# Altium schematic symbol library RF-LIB-SCH.SchLib: 8 symbols
Pins are listed as number, name and electrical type; pins without a type are passive.

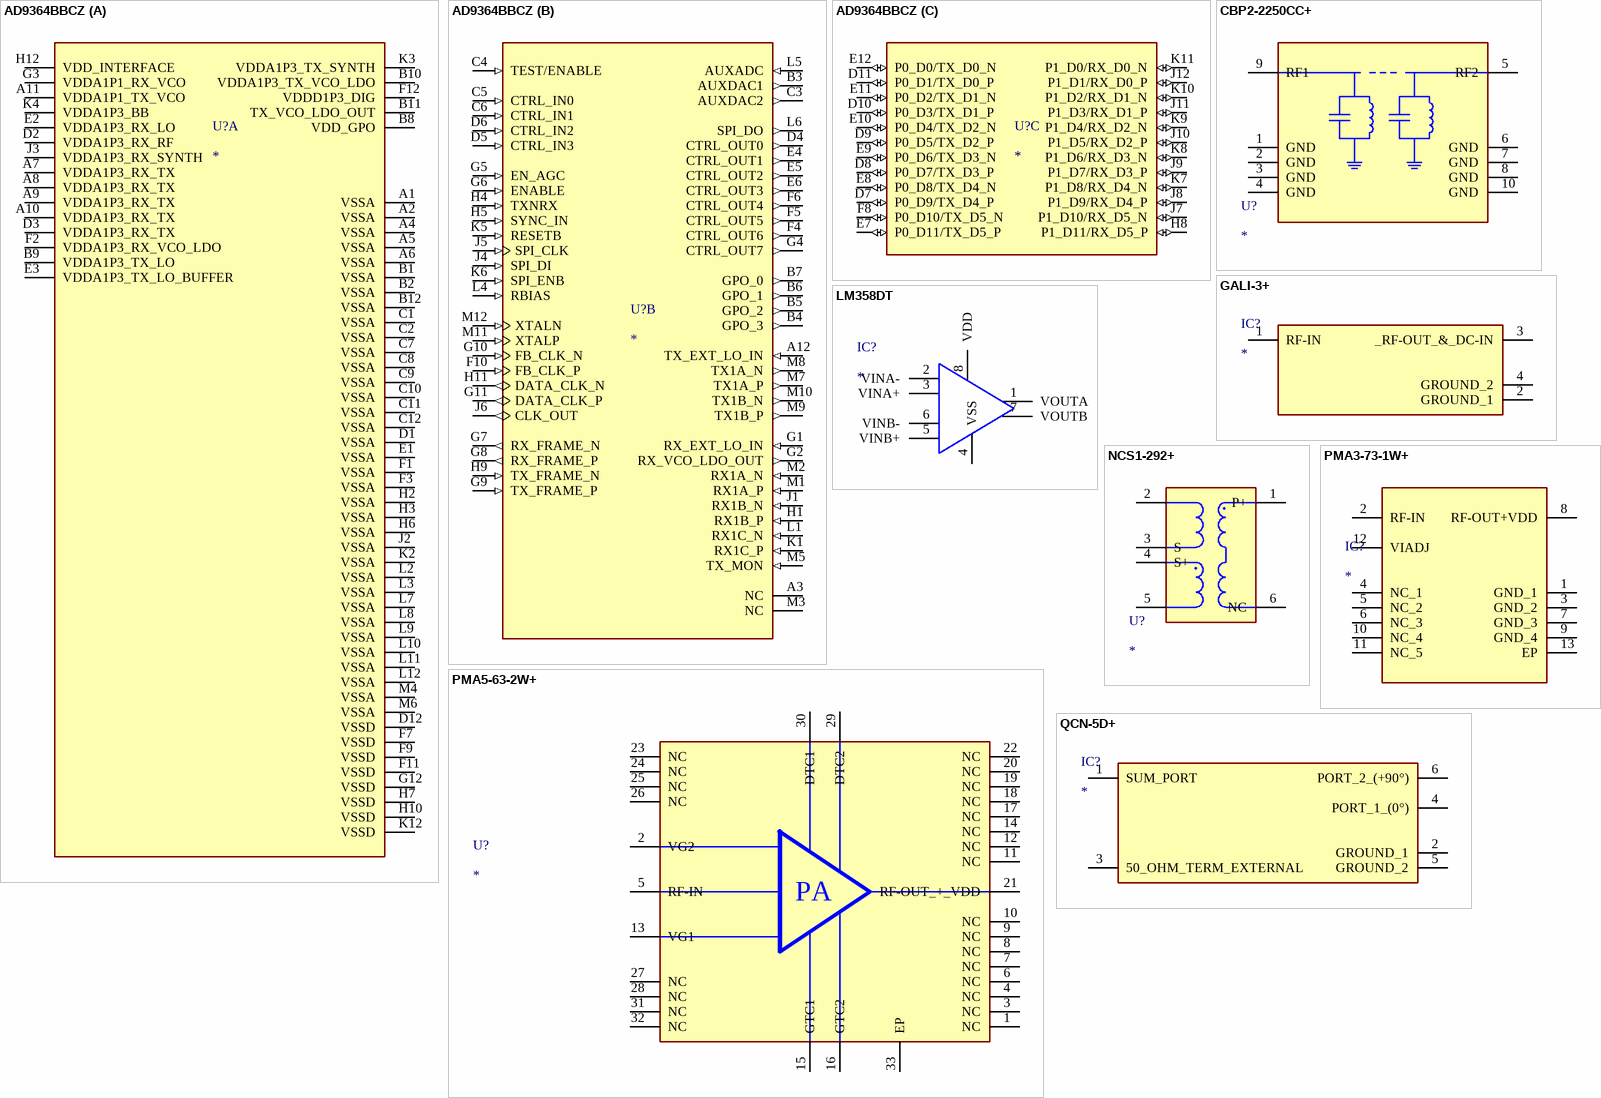
[diagram p0: symbols AD9364BBCZ to QCN-5D+]

## AD9364BBCZ
designator U?
1 x 1 RF Agile Transceiver; Manufacturer: Analog Devices; Manufacturer Part Number: AD9364BBCZ; Population Status: YES; Package: CSPBGA -144 Analog Devices
footprint BGA144C80P12X12_1000X1000X170
part A pins: A1 VSSA (power), A2 VSSA (power), A4 VSSA (power), A5 VSSA (power), A6 VSSA (power), A7 VDDA1P3_RX_TX (power), A8 VDDA1P3_RX_TX (power), A9 VDDA1P3_RX_TX (power), A10 VDDA1P3_RX_TX (power), A11 VDDA1P1_TX_VCO (power), B1 VSSA (power), B2 VSSA (power), B8 VDD_GPO (power), B9 VDDA1P3_TX_LO (power), B10 VDDA1P3_TX_VCO_LDO (power), B11 TX_VCO_LDO_OUT (power), B12 VSSA (power), C1 VSSA (power), C2 VSSA (power), C7 VSSA (power), C8 VSSA (power), C9 VSSA (power), C10 VSSA (power), C11 VSSA (power), C12 VSSA (power), D1 VSSA (power), D2 VDDA1P3_RX_RF (power), D3 VDDA1P3_RX_TX (power), D12 VSSD (power), E1 VSSA (power), E2 VDDA1P3_RX_LO (power), E3 VDDA1P3_TX_LO_BUFFER (power), F1 VSSA (power), F2 VDDA1P3_RX_VCO_LDO (power), F3 VSSA (power), F7 VSSD (power), F9 VSSD (power), F11 VSSD (power), F12 VDDD1P3_DIG (power), G3 VDDA1P1_RX_VCO (power), G12 VSSD (power), H2 VSSA (power), H3 VSSA (power), H6 VSSA (power), H7 VSSD (power), H10 VSSD (power), H12 VDD_INTERFACE (power), J2 VSSA (power), J3 VDDA1P3_RX_SYNTH (power), K2 VSSA (power), K3 VDDA1P3_TX_SYNTH (power), K4 VDDA1P3_BB (power), K12 VSSD (power), L2 VSSA (power), L3 VSSA (power), L7 VSSA (power), L8 VSSA (power), L9 VSSA (power), L10 VSSA (power), L11 VSSA (power), L12 VSSA (power), M4 VSSA (power), M6 VSSA (power)
part B pins: A3 NC, A12 TX_EXT_LO_IN (in), B3 AUXDAC1 (out), B4 GPO_3 (out), B5 GPO_2 (out), B6 GPO_1 (out), B7 GPO_0 (out), C3 AUXDAC2 (out), C4 TEST/ENABLE (in), C5 CTRL_IN0 (in), C6 CTRL_IN1 (in), D4 CTRL_OUT0 (out), D5 CTRL_IN3 (in), D6 CTRL_IN2 (in), E4 CTRL_OUT1 (out), E5 CTRL_OUT2 (out), E6 CTRL_OUT3 (out), F4 CTRL_OUT6 (out), F5 CTRL_OUT5 (out), F6 CTRL_OUT4 (out), F10 FB_CLK_P (in), G1 RX_EXT_LO_IN (in), G2 RX_VCO_LDO_OUT (out), G4 CTRL_OUT7 (out), G5 EN_AGC (in), G6 ENABLE (in), G7 RX_FRAME_N (out), G8 RX_FRAME_P (out), G9 TX_FRAME_P (in), G10 FB_CLK_N (in), G11 DATA_CLK_P (out), H1 RX1B_P (in), H4 TXNRX (in), H5 SYNC_IN (in), H9 TX_FRAME_N (in), H11 DATA_CLK_N (out), J1 RX1B_N (in), J4 SPI_DI (in), J5 SPI_CLK (in), J6 CLK_OUT (out), K1 RX1C_P (in), K5 RESETB (in), K6 SPI_ENB (in), L1 RX1C_N (in), L4 RBIAS (in), L5 AUXADC (in), L6 SPI_DO (out), M1 RX1A_P (in), M2 RX1A_N (in), M3 NC, M5 TX_MON (in), M7 TX1A_P (out), M8 TX1A_N (out), M9 TX1B_P (out), M10 TX1B_N (out), M11 XTALP (in), M12 XTALN (in)
part C pins: D7 P0_D9/TX_D4_P (io), D8 P0_D7/TX_D3_P (io), D9 P0_D5/TX_D2_P (io), D10 P0_D3/TX_D1_P (io), D11 P0_D1/TX_D0_P (io), E7 P0_D11/TX_D5_P (io), E8 P0_D8/TX_D4_N (io), E9 P0_D6/TX_D3_N (io), E10 P0_D4/TX_D2_N (io), E11 P0_D2/TX_D1_N (io), E12 P0_D0/TX_D0_N (io), F8 P0_D10/TX_D5_N (io), H8 P1_D11/RX_D5_P (io), J7 P1_D10/RX_D5_N (io), J8 P1_D9/RX_D4_P (io), J9 P1_D7/RX_D3_P (io), J10 P1_D5/RX_D2_P (io), J11 P1_D3/RX_D1_P (io), J12 P1_D1/RX_D0_P (io), K7 P1_D8/RX_D4_N (io), K8 P1_D6/RX_D3_N (io), K9 P1_D4/RX_D2_N (io), K10 P1_D2/RX_D1_N (io), K11 P1_D0/RX_D0_N (io)

## CBP2-2250CC+
designator U?
CERAMIC BPF, 2000 to 2500 MHz, 50; Manufacturer Part Number: CBP2-2250CC+; Manufacturer: Mini Circuits; Est Price INR: 9525.78; Population Status: DNP; Datasheet Link: https://www.minicircuits.com/pdfs/CBP2-2250CC+.pdf; Height: 3.1mm; Package: 11.45x12.7x3.1mm; Supplier Part Number: -; Supplier: -; Temperature Range: -40 to 85
footprint CBP2-2250CC
pins: 1 GND, 2 GND, 3 GND, 4 GND, 5 RF2, 6 GND, 7 GND, 8 GND, 9 RF1, 10 GND

## GALI-3+
designator IC?
Integrated Circuit; Manufacturer: Mini-Circuits; Manufacturer Part Number: GALI-3+; Population Status: YES; Datasheet Link: https://www.mouser.com/datasheet/2/1030/GALI-3_2b-1700470.pdf; Height: 1.6mm; Supplier Part Number: 139-GALI-3
footprint GALI3 (Footprint not found)
pins: 1 RF-IN, 2 GROUND_1, 3 _RF-OUT_&_DC-IN, 4 GROUND_2

## LM358DT
designator IC?
Integrated Circuit; Manufacturer: Microchip; Manufacturer Part Number: MCP6002-I/SN; Population Status: YES; Datasheet Link: https://datasheet.datasheetarchive.com/originals/distributors/SFDatasheet-4/sf-00090086.pdf; Height: 1.75mm; Supplier Part Number: 579-MCP6002-I/SN
footprint SOIC127P600X175-8N
pins: 1 VOUTA, 2 VINA-, 3 VINA+, 4 VSS, 5 VINB+, 6 VINB-, 7 VOUTB, 8 VDD

## NCS1-292+
designator U?
RF Balun 1.65GHz ~ 2.85GHz 50 / 50Ohm 6-SMD, No Lead; Manufacturer Part Number: NCS1-292+; Manufacturer: Mini-Circuits; Est Price INR: 152.82; Population Status: YES; Datasheet Link: https://www.minicircuits.com/pdfs/NCS1-292+.pdf; Height: 1.069mm; Package: 6-SMD, No Lead; Supplier Part Number: 139-NCS1-292; Supplier: Mouser; Temperature Range: -40 to 85
footprint NCS1292
pins: 1 P+, 2 GND_OR_DC_FEED_+_RF_GND, 3 S, 4 S+, 5 NOT_USED_(GND_EXTREMALLY), 6 NC

## PMA3-73-1W+
designator IC?
Integrated Circuit; Manufacturer: Mini-Circuits; Manufacturer Part Number: PMA3-73-1W+; Population Status: YES; Datasheet Link: https://www.minicircuits.com/WebStore/dashboard.html?model=PMA3-73-1W%2B; Height: 0.89mm
footprint QFN51P300X300X89-13N (Footprint not found)
pins: 1 GND_1, 2 RF-IN, 3 GND_2, 4 NC_1, 5 NC_2, 6 NC_3, 7 GND_3, 8 RF-OUT+VDD, 9 GND_4, 10 NC_4, 11 NC_5, 12 VIADJ, 13 EP

## PMA5-63-2W+
designator U?
RF Amplifier IC 5G, Radar, VSAT 10MHz ~ 6GHz 32-QFN (5x5); Manufacturer Part Number: PMA5-63-2W+; Manufacturer: Mini-Circuits; Est Price INR: 10150.10; Max Current: 400mA; Population Status: YES; Supply Voltage: 12V; Datasheet Link: https://www.minicircuits.com/pdfs/PMA5-63-2W+.pdf; Height: 1mm; Package: 32-VFQFN Exposed Pad; Supplier Part Number: 139-PMA5-63-2W+; Supplier: Mouser; Temperature Range: -45 to 85
footprint QFN50P500X500X100-33N-D
pins: 1 NC, 2 VG2, 3 NC, 4 NC, 5 RF-IN, 6 NC, 7 NC, 8 NC, 9 NC, 10 NC, 11 NC, 12 NC, 13 VG1, 14 NC, 15 GTC1, 16 GTC2, 17 NC, 18 NC, 19 NC, 20 NC, 21 RF-OUT_+_VDD, 22 NC, 23 NC, 24 NC, 25 NC, 26 NC, 27 NC, 28 NC, 29 DTC2, 30 DTC1, 31 NC, 32 NC, 33 EP
text: PA

## QCN-5D+
designator IC?
Integrated Circuit; Manufacturer: Mini-Circuits; Manufacturer Part Number: QCN-5D+; Population Status: YES; Datasheet Link: https://www.mouser.in/datasheet/2/1030/QCN-5D_2b-1701289.pdf; Height: 1.068mm; Supplier Part Number: 139-QCN-5D
footprint QCN5D (Footprint not found)
pins: 1 SUM_PORT, 2 GROUND_1, 3 50_OHM_TERM_EXTERNAL, 4 PORT_1_(0°), 5 GROUND_2, 6 PORT_2_(+90°)